# Altium footprint library FootPrintLib_8.PcbLib: 590 footprints (part 29 of 37)
Each footprint in its own frame and in the unit in brackets; x right, y up, seen from the top. Pads: shape width x height; smd on the part's side, far side on the other; paste and mask are expansions set on the pad; w line width, h text height; cw(c..) or ccw(c..) is an arc to the next point about the centre after c.
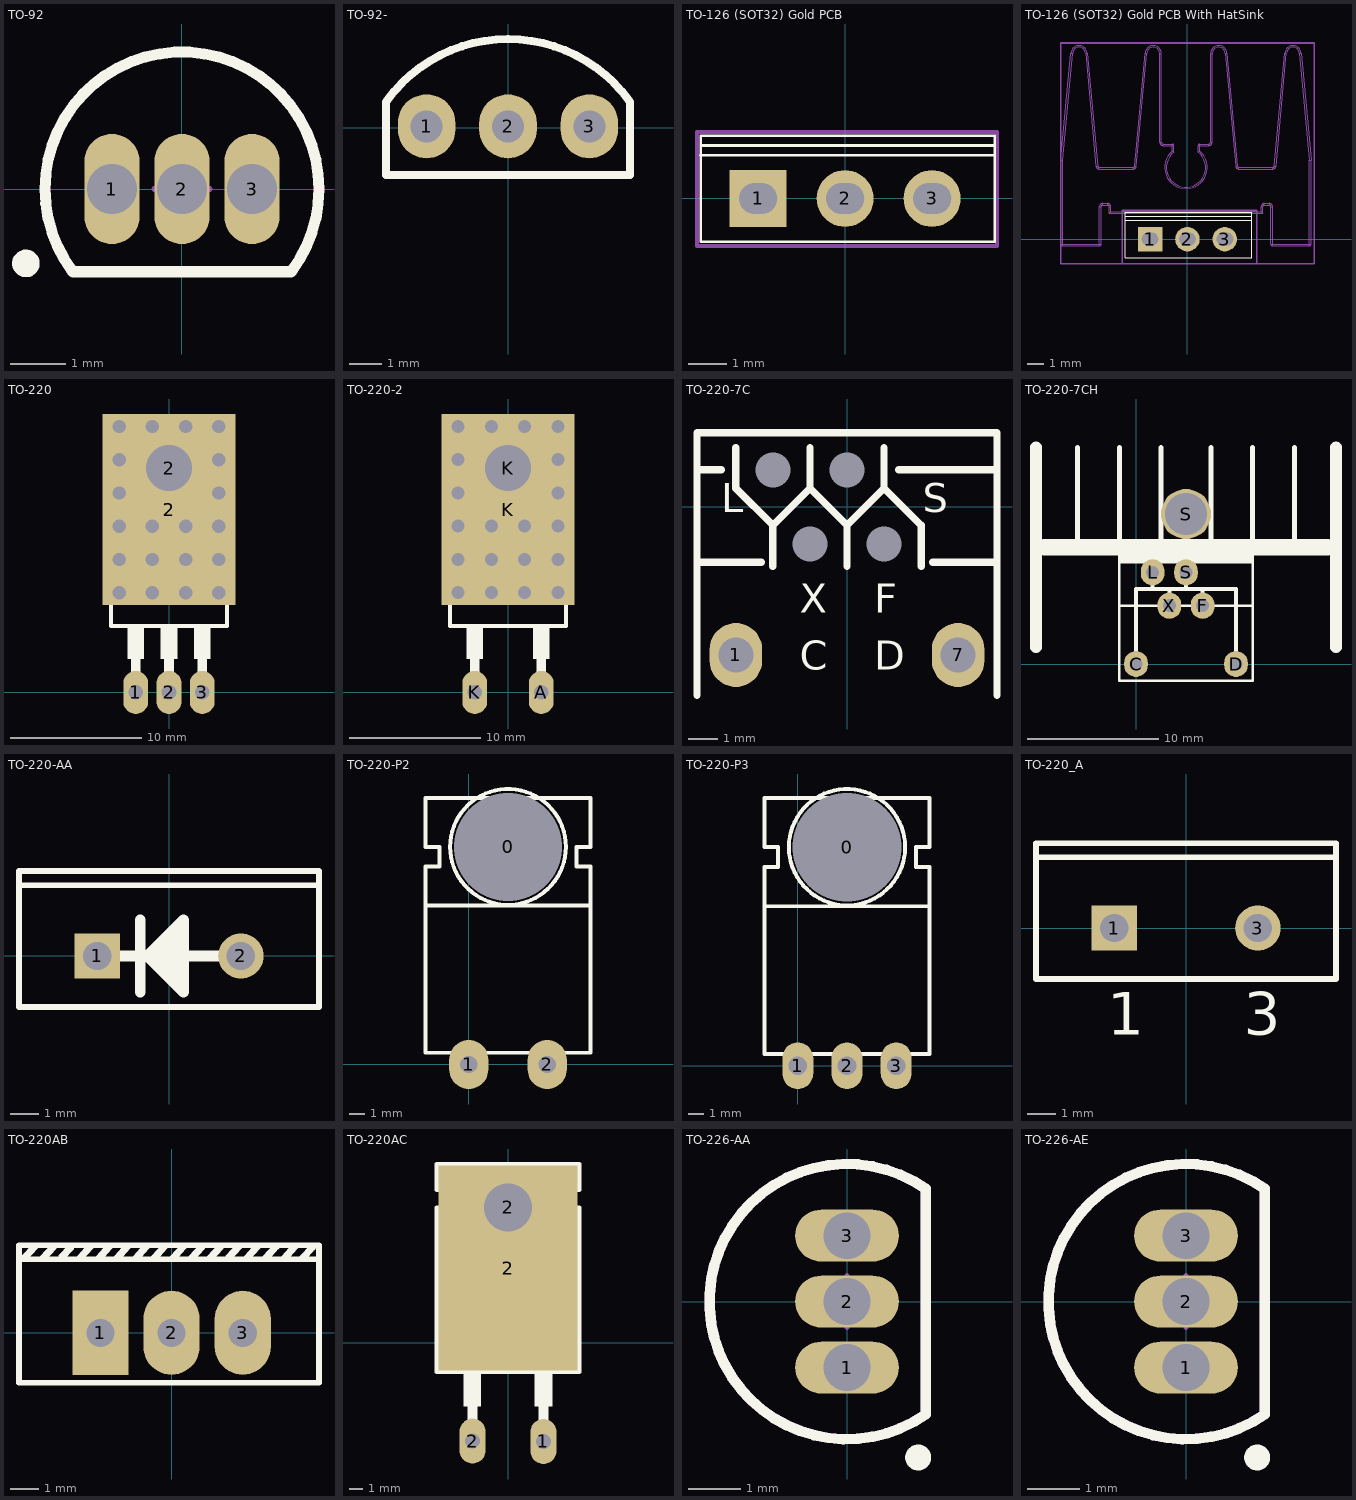
[diagram p28: the footprints below, top view; thin cyan lines are the x and y axes]

## TO-92 [mm] "TO, Flat Index; 3 In-Line, Axial Leads; Body Dia. 4.5mm; Leads 0.51 x 0.48 mm (max)"
height 6.86
pads (3):
  oval 1x2 hole 0.9: 1(-1.262,0.001) 2(0.008,0.001) 3(1.278,0.001)
Top Overlay:
  circle w0.25: c-2.822,-1.349 r0.125
  lines w0.2: -1.972,-1.499 cw(c0.008,0.001) 1.988,-1.499 -1.972,-1.499
Mechanical 13:
  lines w0.1: -1.972,-1.499 cw(c0.008,0.001) 1.988,-1.499 -1.972,-1.499
Mechanical 15:
  lines w0.1: -0.492,0.001 0.508,0.001 ; 0.008,-0.499 0.008,0.501
3D body: height 6.86, standoff 2.2, extent -2.487,-1.499 2.503,2.486

## TO-92- [mm]
height 9.1
pads (3):
  oval 1.8x2 hole 1: 1(-2.54,0.051) 2(0,0.051) 3(2.54,0.051)
Top Overlay:
  lines w0.254: -3.81,0.813 -3.81,-1.473 3.81,-1.473 3.81,0.813 ; -3.777,0.865 cw(c0,-1.905) 3.777,0.865
3D body "SOT54A.stp": height 13.2, standoff -4.7, extent -2.831,-1.406 2.729,2.794

## TO-126 (SOT32) Gold PCB [mm]
height 16
pads (3):
  rect 1.5x1.5 hole 0.8 slot 1 at 0 deg: 1(-2.29,0)
  round 1.5 hole 0.8 slot 1 at 0 deg: 2(0,0) 3(2.29,0)
Top Overlay:
  lines w0.07: -3.81,1.143 3.937,1.143 3.937,1.651 ; -3.8,1.397 3.937,1.397 ; 3.937,1.651 3.937,-1.143 -3.8,-1.143 -3.8,1.651 3.937,1.651
Mechanical 15:
  lines w0.1: -3.9,-1.25 4,-1.25 4,1.75 -3.9,1.75 -3.9,-1.25
3D body "User Library-TO-126 (SOT32) Gold PCB.STEP": height 13.19, standoff -3.54, extent -3.8,-1 3.8,1.55

## TO-126 (SOT32) Gold PCB With HatSink [mm]
height 16
pads (3):
  rect 1.5x1.5 hole 0.8 slot 1 at 0 deg: 1(-2.29,0)
  round 1.5 hole 0.8 slot 1 at 0 deg: 2(0,0) 3(2.29,0)
Top Overlay:
  lines w0.07: -3.81,1.143 3.937,1.143 3.937,1.651 ; -3.8,1.397 3.937,1.397 ; 3.937,1.651 3.937,-1.143 -3.8,-1.143 -3.8,1.651 3.937,1.651
Mechanical 1:
  lines w0.013: -7.74,-0.318 ccw(c-7.64,-0.318) -7.64,-0.418 ; -5.498,4.473 ccw(c-5.399,4.482) -5.399,4.382 ; -5.39,-0.418 ccw(c-5.39,-0.318) -5.29,-0.318 ; -5.29,1.982 cw(c-5.19,1.982) -5.19,2.082 ; -4.89,2.082 cw(c-4.89,1.982) -4.79,1.982 ; -3.327,4.382 ccw(c-3.327,4.482) -3.227,4.473 ; -1.59,5.919 ccw(c-1.49,5.919) -1.49,5.819 ; -0.94,5.819 cw(c-0.94,5.719) -0.84,5.719 ; 0.66,5.719 cw(c0.76,5.719) 0.76,5.819 ; 1.31,5.819 ccw(c1.31,5.919) 1.41,5.919 ; 3.047,4.473 ccw(c3.147,4.482) 3.147,4.382 ; 4.61,1.982 cw(c4.71,1.982) 4.71,2.082 ; 5.01,2.082 cw(c5.01,1.982) 5.11,1.982 ; 5.11,-0.318 ccw(c5.21,-0.318) 5.21,-0.418 ; 5.219,4.382 ccw(c5.219,4.482) 5.318,4.473 ; 7.46,-0.418 ccw(c7.46,-0.318) 7.56,-0.318
  lines w0.05: -7.74,4.832 -7.133,11.388 ; -7.74,4.832 -7.64,4.827 ; -7.74,4.832 -7.74,-0.318 -7.64,-0.318 ; -7.64,-0.318 -7.64,-0.418 -5.39,-0.418 -5.39,-0.318 ; -7.64,-0.318 -7.64,4.827 ; -7.64,-0.318 -5.39,-0.318 ; -7.64,4.827 -7.034,11.379 ; -7.133,11.388 cw(c-6.636,11.342) -6.138,11.388 ; -7.133,11.388 -7.034,11.379 ; -7.034,11.379 cw(c-6.636,11.342) -6.237,11.379 ; -6.237,11.379 -6.138,11.388 ; -6.237,11.379 -5.598,4.464 ; -6.138,11.388 -5.498,4.473 -5.598,4.464 ; -5.598,4.464 ccw(c-5.399,4.482) -5.399,4.282 ; -5.399,4.282 -5.399,4.382 -3.327,4.382 -3.327,4.282 ; -5.399,4.282 -3.327,4.282 ; -5.39,-0.318 -5.29,-0.318 -5.29,1.982 -5.39,1.982 ; -5.39,-0.318 -5.39,1.982 ; -5.39,1.982 cw(c-5.19,1.982) -5.19,2.182 ; -5.19,2.182 -5.19,2.082 -4.89,2.082 -4.89,2.182 ; -5.19,2.182 -4.89,2.182 ; -4.89,2.182 cw(c-4.89,1.982) -4.69,1.982 ; -4.79,1.582 -4.79,1.982 -4.69,1.982 ; -4.79,1.582 -4.69,1.682 ; -4.79,1.582 4.61,1.582 ; -4.69,1.682 -4.69,1.982 ; -4.69,1.682 4.51,1.682 ; -3.327,4.282 ccw(c-3.327,4.482) -3.128,4.464 ; -3.128,4.464 -3.227,4.473 -2.588,11.388 ; -3.128,4.464 -2.488,11.379 ; -2.588,11.388 cw(c-2.09,11.342) -1.59,11.342 ; -2.588,11.388 -2.488,11.379 ; -2.488,11.379 cw(c-2.09,11.342) -1.69,11.342 ; -1.69,5.919 ccw(c-1.49,5.919) -1.49,5.719 ; -1.69,5.919 -1.59,5.919 -1.59,11.342 ; -1.69,5.919 -1.69,11.342 ; -1.69,11.342 -1.59,11.342 ; -1.49,5.719 -1.49,5.819 -0.94,5.819 -0.94,5.719 ; -1.49,5.719 -0.94,5.719 ; -0.94,5.366 ccw(c-0.09,4.382) 0.76,5.366 ; -0.94,5.366 cw(c-3.387,0.015) -0.84,5.319 ; -0.94,5.366 -0.94,5.719 ; -0.94,5.719 -0.84,5.719 -0.84,5.319 ; -0.84,5.319 ccw(c-0.09,4.382) 0.66,5.319 ; 0.66,5.319 cw(c3.206,0.015) 0.76,5.366 ; 0.66,5.319 0.66,5.719 0.76,5.719 ; 0.76,5.366 0.76,5.719 ; 0.76,5.719 0.76,5.819 1.31,5.819 1.31,5.719 ; 0.76,5.719 1.31,5.719 ; 1.31,5.719 ccw(c1.31,5.919) 1.51,5.919 ; 1.41,11.342 cw(c1.91,11.342) 2.408,11.388 ; 1.41,11.342 1.51,11.342 ; 1.41,11.342 1.41,5.919 1.51,5.919 ; 1.51,5.919 1.51,11.342 ; 1.51,11.342 cw(c1.91,11.342) 2.308,11.379 ; 2.308,11.379 2.408,11.388 ; 2.308,11.379 2.947,4.464 ; 2.408,11.388 3.047,4.473 2.947,4.464 ; 2.947,4.464 ccw(c3.147,4.482) 3.147,4.282 ; 3.147,4.282 3.147,4.382 5.219,4.382 5.219,4.282 ; 3.147,4.282 5.219,4.282 ; 4.51,1.682 4.51,1.982 ; 4.51,1.682 4.61,1.582 ; 4.51,1.982 cw(c4.71,1.982) 4.71,2.182 ; 4.51,1.982 4.61,1.982 4.61,1.582 ; 4.71,2.182 4.71,2.082 5.01,2.082 5.01,2.182 ; 4.71,2.182 5.01,2.182 ; 5.01,2.182 cw(c5.01,1.982) 5.21,1.982 ; 5.21,-0.318 5.11,-0.318 5.11,1.982 5.21,1.982 ; 5.21,-0.318 5.21,-0.418 7.46,-0.418 7.46,-0.318 ; 5.21,-0.318 5.21,1.982 ; 5.21,-0.318 7.46,-0.318 ; 5.219,4.282 ccw(c5.219,4.482) 5.418,4.464 ; 5.418,4.464 5.318,4.473 5.958,11.388 ; 5.418,4.464 6.057,11.379 ; 5.958,11.388 cw(c6.455,11.342) 6.953,11.388 ; 5.958,11.388 6.057,11.379 ; 6.057,11.379 cw(c6.455,11.342) 6.854,11.379 ; 6.854,11.379 6.953,11.388 ; 6.854,11.379 7.46,4.827 ; 6.953,11.388 7.56,4.832 ; 7.46,-0.318 7.46,4.827 ; 7.46,-0.318 7.56,-0.318 7.56,4.832 ; 7.46,4.827 7.56,4.832
Mechanical 15:
  lines w0.1: -4,-1.5 -4,1.75 4.25,1.75 4.25,-1.5 ; -7.75,-1.5 7.75,-1.5 7.75,12 -7.75,12 -7.75,-1.5
3D body "User Library-Heatsink-57AS.STEP": height 26.5, standoff 1.5, extent -7.68,-0.381 7.62,11.878
3D body "User Library-TO-126 (SOT32) Gold PCB.STEP": height 13.19, standoff -3.54, extent -3.8,-1 3.8,1.55

## TO-220 [mil]
pads (5):
  oval 75x130 hole 44: 1(-100,0) 2(0,0) 3(100,0)
  rect 400x575 all layers, no hole: 2(0,550)
  round 157.48 hole 137.8: 2(0,675)
via -150,800 diameter 40 hole 40
via -50,800 diameter 40 hole 40
via 50,800 diameter 40 hole 40
via 150,800 diameter 40 hole 40
via 150,700 diameter 40 hole 40
via 150,600 diameter 40 hole 40
via 150,500 diameter 40 hole 40
via 150,400 diameter 40 hole 40
via 150,300 diameter 40 hole 40
via 50,300 diameter 40 hole 40
via -50,300 diameter 40 hole 40
via -150,300 diameter 40 hole 40
via -150,400 diameter 40 hole 40
via -50,400 diameter 40 hole 40
via 50,400 diameter 40 hole 40
via 50,500 diameter 40 hole 40
via -50,500 diameter 40 hole 40
via -150,500 diameter 40 hole 40
via -150,600 diameter 40 hole 40
via -150,700 diameter 40 hole 40
Top Overlay:
  circle w12: c0,675 r75
  rectangle: -125,100.08 -75,200.08
  rectangle: -25,100.08 25,200.08
  rectangle: 75,100.08 125,200.08
  lines w12: -175,550 175,550 ; -175,200 175,200 175,675 150,675 150,725 175,725 175,800 -175,800 -175,725 -150,725 -150,675 -175,675 -175,200
  lines w29.53: -100,0 -100,100 ; 0,0 0,100 ; 100,0 100,100

## TO-220-2 [mil]
pads (4):
  oval 75x130 hole 44: A(100,0) K(-100,0)
  rect 400x575 all layers, no hole: K(0,550)
  round 157.48 hole 137.8: K(0,675)
via -150,800 diameter 59.06 hole 39.37
via -50,800 diameter 59.06 hole 39.37
via 50,800 diameter 59.06 hole 39.37
via 150,800 diameter 59.06 hole 39.37
via 150,700 diameter 59.06 hole 39.37
via 150,600 diameter 59.06 hole 39.37
via 150,500 diameter 59.06 hole 39.37
via 150,400 diameter 59.06 hole 39.37
via 150,300 diameter 59.06 hole 39.37
via 50,300 diameter 59.06 hole 39.37
via -50,300 diameter 59.06 hole 39.37
via -150,300 diameter 59.06 hole 39.37
via -150,400 diameter 59.06 hole 39.37
via -50,400 diameter 59.06 hole 39.37
via 50,400 diameter 59.06 hole 39.37
via 50,500 diameter 59.06 hole 39.37
via -50,500 diameter 59.06 hole 39.37
via -150,500 diameter 59.06 hole 39.37
via -150,600 diameter 59.06 hole 39.37
via -150,700 diameter 59.06 hole 39.37
Top Overlay:
  rectangle: -125,100.08 -75,200.08
  rectangle: 75,100.08 125,200.08
  lines w12: -175,260 -175,200 175,200 175,260
  lines w29.53: -100,0 -100,100 ; 100,0 100,100

## TO-220-7C [mm]
height 19.76
pads (6):
  oval 1.8x2.2 hole 1.2 mask+0.102: 1(-3.81,-5.08)
  round 0 / inner round 0 / far side oval 1.8x2.2 hole 1.2: 2(-2.54,1.27) 4(0,1.27)
  round 0 / inner round 0 / far side oval 1.6x2.2 hole 1.2: 3(-1.27,-1.27)
  round 0 / inner round 0 / far side oval 1.7x2.2 hole 1.2: 5(1.27,-1.27)
  oval 1.8x2.2 hole 1.2: 7(3.81,-5.08)
Top Overlay:
  lines w0.254: -5.145,-6.46 -5.145,2.54 5.145,2.54 5.145,-6.46 ; -5.145,-1.905 -2.94,-1.905 ; -5.145,1.27 -4.31,1.27 ; -3.81,2.032 -3.81,0.635 -2.54,-0.635 ; -2.54,-2.032 -2.54,-0.635 ; -1.27,2.032 -1.27,0.635 ; 0,-2.032 0,-0.635 ; 1.27,2.032 1.27,0.635 ; 1.77,1.27 5.145,1.27 ; 2.54,-2.032 2.54,-0.635 1.27,0.635 ; 2.94,-1.905 5.145,-1.905 ; -2.54,-0.635 -1.27,0.635 ; -1.27,0.635 0,-0.635 ; 0,-0.635 1.27,0.635
  text "C" at -1.626,-5.588 h1
  text "X" at -1.626,-3.632 h1
  text "F" at 0.94,-3.632 h1
  text "D" at 0.94,-5.588 h1
  text "S" at 2.591,-0.178 h1
  text "L" at -4.318,-0.178 h1
Bottom Overlay:
  lines w0.254: -3.81,2.032 -3.81,0.635 -2.54,-0.635 ; -2.54,-2.032 -2.54,-0.635 ; -1.27,2.032 -1.27,0.635 ; 0,-2.032 0,-0.635 ; 1.27,2.032 1.27,0.635 ; 2.54,-2.032 2.54,-0.635 1.27,0.635 ; -2.54,-0.635 -1.27,0.635 ; -1.27,0.635 0,-0.635 ; 0,-0.635 1.27,0.635

## TO-220-7CH [mm]
pads (7):
  oval 1.8x2 hole 1: C(0,0) D(7.62,0) F(5.08,4.445) L(1.27,6.985) S(3.81,6.985) X(2.54,4.445)
  round 3.81 hole 3.2: S(3.81,11.43)
Top Overlay:
  lines w0.178: -1.27,4.445 8.89,4.445 ; -1.27,7.874 -1.27,8.255 -1.27,-1.27 8.89,-1.27 8.89,8.255 8.89,7.874
  lines w0.3: 0,-0.635 0,5.715 7.62,5.715 7.62,-0.635 ; 1.27,5.715 1.27,6.985 ; 2.54,4.445 2.54,5.715 ; 3.81,5.715 3.81,6.985 ; 5.08,4.445 5.08,5.715
  lines w0.381: -4.445,8.89 -4.445,16.51 ; -1.27,8.89 -1.27,16.51 ; 1.905,8.89 1.905,16.51 ; 5.715,8.89 5.715,16.51 ; 8.89,8.89 8.89,16.51 ; 12.065,8.89 12.065,16.51
  lines w0.4: -1.143,7.874 8.763,7.874 ; -1.143,8.255 8.763,8.255
  lines w0.889: -7.62,1.27 -7.62,16.51 ; 15.24,1.27 15.24,16.51
  lines w1.27: -6.985,8.89 14.605,8.89

## TO-220-AA [mm] "TO, Thru-Hole, Vertical, Heatsink Mounted; 3 In-Line Leads (1 Absent); Pitch 2.54 mm"
height 19.3
pads (2):
  rect 1.6x1.6 hole 1: 1(-2.54,0)
  round 1.6 hole 1: 2(2.54,0)
Top Overlay:
  lines w0.2: -5.3,2.5 5.3,2.5 ; -5.3,-1.8 -5.3,3 5.3,3 5.3,-1.8 -5.3,-1.8
  lines w0.381: -2.54,0 2.54,0 ; -1.016,-1.27 -1.016,1.27 ; -0.254,-0.508 -0.254,0.508 ; 0,-0.762 0,0.762 ; 0.254,-1.016 0.254,1.016 ; -0.762,0 0.508,-1.27 0.508,1.27 -0.762,0

## TO-220-P2 [mm]
pads (3):
  round 4 hole 7: 0(2.54,14.097)
  oval 2.54x3.175 hole 1.118: 1(0,0) 2(5.08,0)
Top Overlay:
  circle w0.254: c2.54,14.097 r3.75
  lines w0.254: -2.794,10.287 7.874,10.287 ; -2.794,0.762 -2.794,12.827 -1.905,12.827 -1.905,14.097 -2.794,14.097 -2.794,17.272 7.874,17.272 7.874,14.097 6.985,14.097 6.985,12.827 7.874,12.827 7.874,0.762 -2.794,0.762
Bottom Overlay:
  circle w0.305: c2.54,14.097 r3.75
  lines w0.254: -2.794,10.287 7.874,10.287 ; -2.794,0.762 7.874,0.762 7.874,12.827 6.985,12.827 6.985,14.097 7.874,14.097 7.874,17.272 -2.794,17.272 -2.794,14.097 -1.905,14.097 -1.905,12.827 -2.794,12.827 -2.794,0.762

## TO-220-P3 [mm]
pads (4):
  round 4 hole 7: 0(3.175,14.097)
  oval 2x3 hole 1.2: 1(0,0) 2(3.175,0) 3(6.35,0)
Top Overlay:
  circle w0.254: c3.175,14.097 r3.75
  lines w0.254: -2.159,10.287 8.509,10.287 ; -2.159,0.762 -2.159,12.827 -1.27,12.827 -1.27,14.097 -2.159,14.097 -2.159,17.272 8.509,17.272 8.509,14.097 7.62,14.097 7.62,12.827 8.509,12.827 8.509,0.762 -2.159,0.762
Bottom Overlay:
  circle w0.305: c3.175,14.097 r3.75
  lines w0.254: -2.159,10.287 8.509,10.287 ; -2.159,0.762 8.509,0.762 8.509,12.827 7.62,12.827 7.62,14.097 8.509,14.097 8.509,17.272 -2.159,17.272 -2.159,14.097 -1.27,14.097 -1.27,12.827 -2.159,12.827 -2.159,0.762

## TO-220_A [mm] "TO, Thru-Hole, Vertical, Heatsink Mounted; 3 In-Line Leads (1 Absent); Pitch 2.54 mm"
height 19.3
pads (2):
  rect 1.6x1.6 hole 1: 1(-2.54,0)
  round 1.6 hole 1: 3(2.54,0)
Top Overlay:
  lines w0.2: -5.3,2.5 5.3,2.5 ; -5.3,-1.8 5.3,-1.8 5.3,3 -5.3,3 -5.3,-1.8
  text "3" at 2.04,-3.775 h1.5
  text "1" at -2.79,-3.775 h1.5

## TO-220AB [mm] "TO-220AB, Thru-Hole, Vertical, Heatsink Mounted; 3 In-Line Leads; Pitch 2.54 mm"
height 19.7
pads (3):
  rect 2x3 hole 1: 1(-2.54,0)
  oval 2x3 hole 1: 2(0,0) 3(2.54,0)
Top Overlay:
  lines w0.2: -5.42,2.62 5.23,2.62 ; -5.44,-1.78 -5.44,3.12 5.26,3.12 5.26,-1.78 -5.44,-1.78
  lines w0.254: -5.25,2.66 -4.866,3.086 ; -4.588,2.65 -4.204,3.076 ; -3.926,2.682 -3.58,3.066 ; -3.264,2.67 -2.881,3.096 ; -2.603,2.65 -2.219,3.076 ; -1.941,2.67 -1.557,3.096 ; -1.279,2.65 -0.895,3.076 ; -0.617,2.67 -0.233,3.096 ; 0.045,2.65 0.429,3.076 ; 0.707,2.65 1.09,3.076 ; 1.369,2.65 1.752,3.076 ; 2.03,2.67 2.414,3.096 ; 2.692,2.67 3.076,3.096 ; 3.354,2.66 3.738,3.086 ; 4.016,2.651 4.4,3.077 ; 4.678,2.663 5.028,3.052
3D body "TO-220AB-ST.stp": height 19.5, standoff -9.2, extent -5.367,-1.663 5.283,3.137

## TO-220AC [mil]
height 200
pads (4):
  oval 75x130 hole 44: 1(101.93,-284) 2(-101.93,-283)
  rect 400x590 smd: 2(0,215)
  round 157.48 hole 137.8: 2(0,390)
Top Overlay:
  circle w10: c2.32,390 r82.68
  circle w12: c0,390 r75
  rectangle: -128.3,-183.92 -77.12,-85
  rectangle: 76.42,-183.92 127.6,-85
  lines w12: -200,265 200,265 ; -205,-84 201,-84 205,-84 205,390 180,390 180,440 205,440 205,515 -205,515 -205,440 -180,440 -180,390 -205,390 -205,-84
  lines w29.53: -101.93,-283 -101.93,-183 ; 101.93,-284 101.93,-184

## TO-226-AA [mm] "TO, Flat Index; 3 In-Line, Axial Leads; Body Dia. 4.8mm; Leads 0.55 x 0.51 mm (max)"
height 5.33
pads (3):
  oval 2x1 hole 0.9: 1(0,-1.27) 2(0,0) 3(0,1.27)
Top Overlay:
  circle w0.25: c1.371,-3.003 r0.125
  lines w0.2: 1.52,-2.171 cw(c0,0) 1.52,2.171 1.52,-2.171
Mechanical 13:
  lines w0.2: 1.52,-2.171 cw(c0,0) 1.52,2.171 1.52,-2.171
Mechanical 15:
  lines w0.1: -0.5,0 0.5,0 ; 0,-0.5 0,0.5
3D body: height 5.33, standoff 0, extent -2.651,-2.661 1.52,2.661

## TO-226-AE [mm] "TO, Flat Index; 3 In-Line, Axial Leads; Body Dia. 4.8mm; Leads 0.55 x 0.51 mm (max)"
height 7.87
pads (3):
  oval 2x1 hole 0.9: 1(0,-1.27) 2(0,0) 3(0,1.27)
Top Overlay:
  circle w0.25: c1.371,-3.003 r0.125
  lines w0.2: 1.52,-2.171 cw(c0,0) 1.52,2.171 1.52,-2.171
Mechanical 13:
  lines w0.2: 1.52,-2.171 cw(c0,0) 1.52,2.171 1.52,-2.171
Mechanical 15:
  lines w0.1: -0.5,0 0.5,0 ; 0,-0.5 0,0.5
3D body: height 7.87, standoff 0, extent -2.651,-2.661 1.52,2.661